# Altium footprint library APE-SBC.PcbLib: 65 footprints (part 3 of 5)
Each footprint in its own frame and in the unit in brackets; x right, y up, seen from the top. Pads: shape width x height; smd on the part's side, far side on the other; paste and mask are expansions set on the pad; w line width, h text height; cw(c..) or ccw(c..) is an arc to the next point about the centre after c.
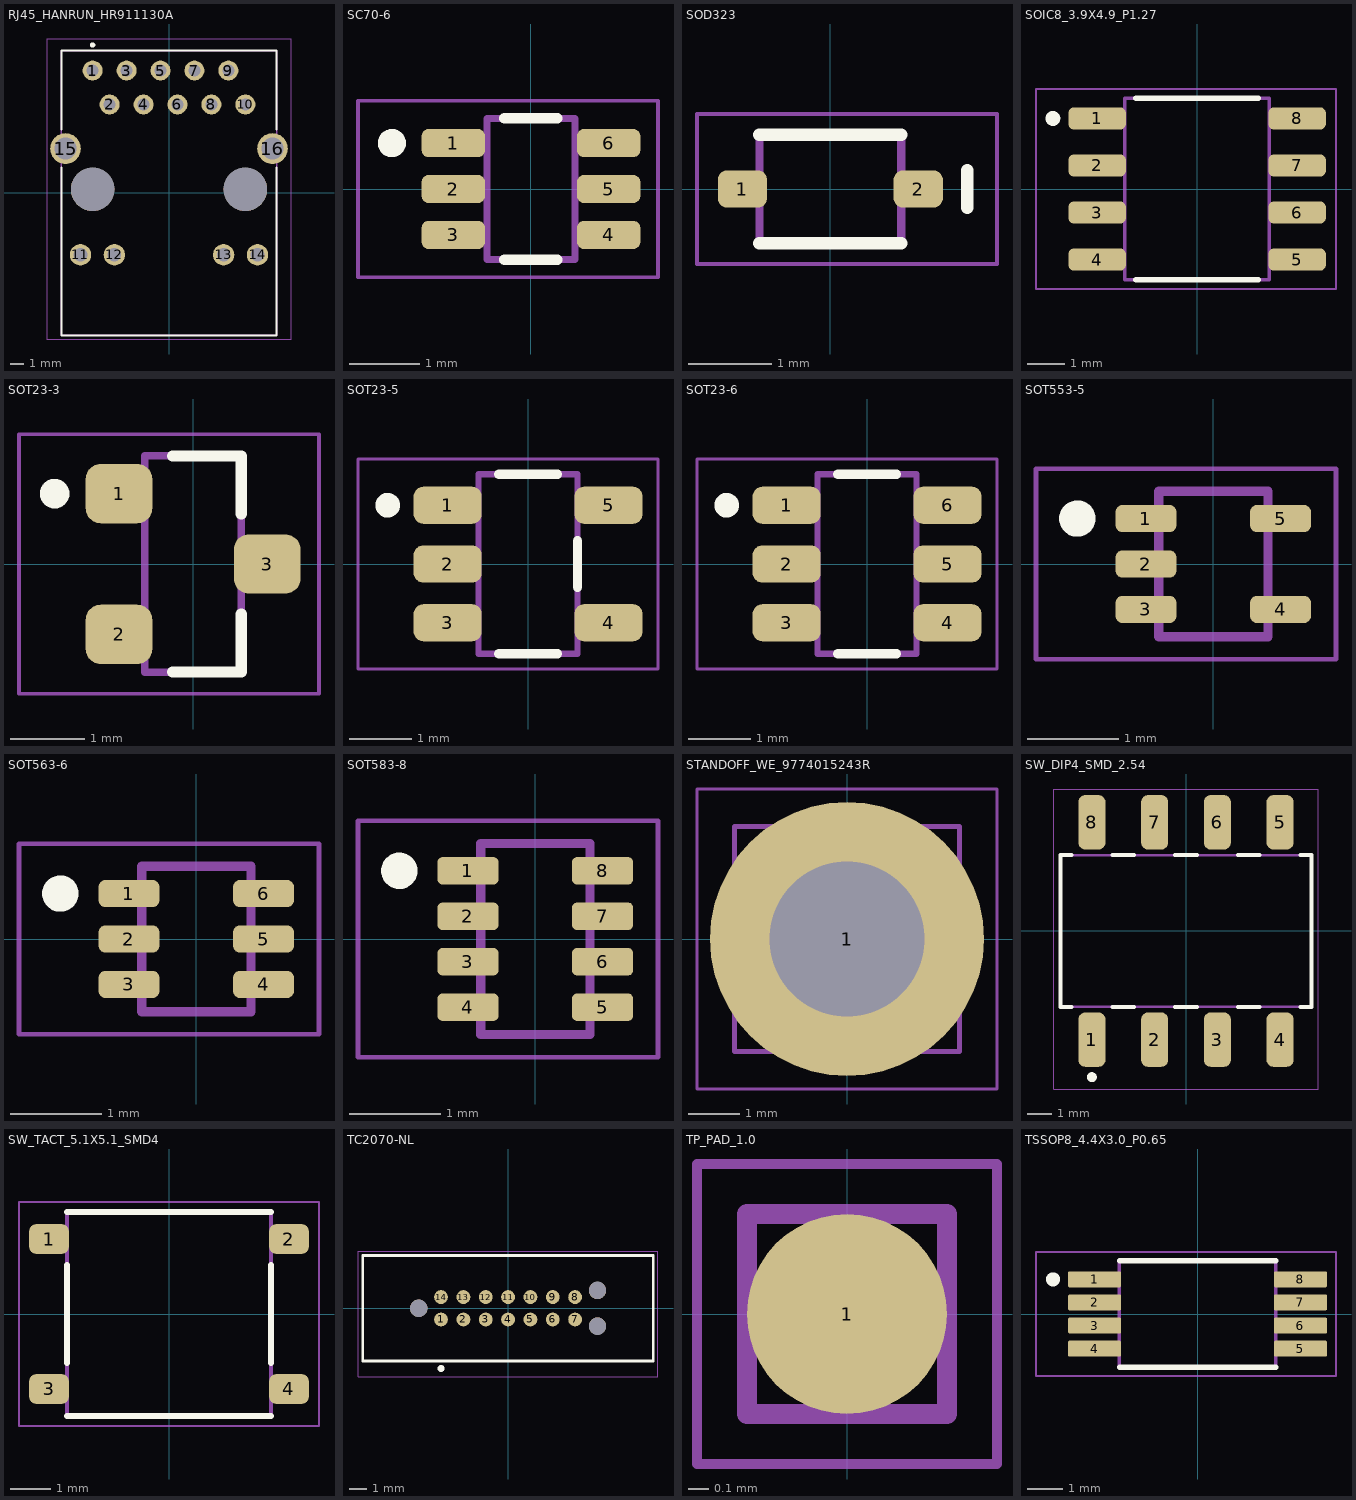
[diagram p2: the footprints below, top view; thin cyan lines are the x and y axes]

## RJ45_HANRUN_HR911130A [mm] "HanRun HR911130A RJ45 MagJack 1000BASE-T with LEDs, shielded, THT (HanRun mounting pattern)"
pads (18):
  round 1.5 hole 0.89: 1(-5.715,9.16) 2(-4.445,6.62) 3(-3.175,9.16) 4(-1.905,6.62) 5(-0.635,9.16) 6(0.635,6.62) 7(1.905,9.16) 8(3.175,6.62) 9(4.445,9.16) 10(5.715,6.62)
  round 1.6 hole 1.02: 11(-6.625,-4.63) 12(-4.085,-4.63) 13(4.085,-4.63) 14(6.625,-4.63)
  round 2.3 hole 1.63: 15(-7.745,3.32) 16(7.745,3.32)
  round 3.25 hole 3.25 unplated: ""(-5.715,0.27) ""(5.715,0.27)
Top Overlay:
  circle w0.2: c-5.715,11.07 r0.1
  lines w0.15: -8.05,1.895 -8.05,-10.65 8.05,-10.65 8.05,1.895 ; -8.05,4.745 -8.05,10.65 8.05,10.65 8.05,4.745
Mechanical 13:
  lines w0.1: -8.05,-10.65 8.05,-10.65 8.05,10.65 -8.05,10.65 -8.05,-10.65
Mechanical 15:
  lines w0.05: -9.15,-10.93 9.15,-10.93 9.15,11.52 -9.15,11.52 -9.15,-10.93

## SC70-6 [mm] "SC70-6 / SOT-363 (TI DCK0006A), 0.65 mm pitch, 0.9 x 0.4 mm pads"
pads (6):
  rrect50% 0.9x0.4 smd: 1(-1.1,0.65) 2(-1.1,0) 3(-1.1,-0.65) 4(1.1,-0.65) 5(1.1,0) 6(1.1,0.65)
Top Overlay:
  circle w0.2: c-1.97,0.65 r0.1
  lines w0.15: -0.375,-1 0.375,-1 ; -0.375,1 0.375,1
Mechanical 13:
  lines w0.1: -0.625,-1 -0.625,1 0.625,1 0.625,-1 -0.625,-1
Mechanical 15:
  lines w0.05: -2.45,-1.25 -2.45,1.25 1.8,1.25 1.8,-1.25 -2.45,-1.25

## SOD323 [mm] "SOD-323 (SC-76) diode, pad 1 anode / pad 2 cathode, Diodes Inc. suggested pad layout"
pads (2):
  rrect50% 0.59x0.45 smd: 1(-1.055,0) 2(1.055,0)
Top Overlay:
  lines w0.15: -0.85,-0.65 0.85,-0.65 ; -0.85,0.65 0.85,0.65 ; 1.645,-0.225 1.645,0.225
Mechanical 13:
  lines w0.1: -0.85,-0.65 0.85,-0.65 0.85,0.65 -0.85,0.65 -0.85,-0.65
Mechanical 15:
  lines w0.05: -1.6,-0.9 2,-0.9 2,0.9 -1.6,0.9 -1.6,-0.9

## SOIC8_3.9X4.9_P1.27 [mm] "SOIC-8 3.9x4.9 mm, 1.27 mm pitch (Microchip SN / Atmel 8S1), Microchip C04-2057-SN land"
pads (8):
  rrect50% 1.55x0.6 smd: 1(-2.7,1.905) 2(-2.7,0.635) 3(-2.7,-0.635) 4(-2.7,-1.905) 5(2.7,-1.905) 6(2.7,-0.635) 7(2.7,0.635) 8(2.7,1.905)
Top Overlay:
  circle w0.2: c-3.895,1.905 r0.1
  lines w0.15: -1.65,-2.45 1.65,-2.45 ; -1.65,2.45 1.65,2.45
Mechanical 13:
  lines w0.1: -1.95,-2.45 1.95,-2.45 1.95,2.45 -1.95,2.45 -1.95,-2.45
Mechanical 15:
  lines w0.05: -4.35,-2.7 3.75,-2.7 3.75,2.7 -4.35,2.7 -4.35,-2.7

## SOT23-3 [mm] "SOT-23 3-lead (LRC soldering footprint), 0.95 mm pitch, 0.9 x 0.8 mm pads"
pads (3):
  rrect50% 0.9x0.8 smd: 1(-1,0.95) 2(-1,-0.95) 3(1,0)
Top Overlay:
  circle w0.2: c-1.87,0.95 r0.1
  lines w0.15: -0.275,-1.46 0.65,-1.46 0.65,-0.675 ; -0.275,1.46 0.65,1.46 0.65,0.675
Mechanical 13:
  lines w0.1: -0.65,-1.46 -0.65,1.46 0.65,1.46 0.65,-1.46 -0.65,-1.46
Mechanical 15:
  lines w0.05: -2.35,-1.75 -2.35,1.75 1.7,1.75 1.7,-1.75 -2.35,-1.75

## SOT23-5 [mm] "SOT-23-5 (TI DBV0005A), 0.95 mm pitch, 1.1 x 0.6 mm pads"
pads (5):
  rrect50% 1.1x0.6 smd: 1(-1.3,0.95) 2(-1.3,0) 3(-1.3,-0.95) 4(1.3,-0.95) 5(1.3,0.95)
Top Overlay:
  circle w0.2: c-2.27,0.95 r0.1
  lines w0.15: -0.475,-1.45 0.475,-1.45 ; -0.475,1.45 0.475,1.45 ; 0.8,-0.375 0.8,0.375
Mechanical 13:
  lines w0.1: -0.8,-1.45 -0.8,1.45 0.8,1.45 0.8,-1.45 -0.8,-1.45
Mechanical 15:
  lines w0.05: -2.75,-1.7 -2.75,1.7 2.1,1.7 2.1,-1.7 -2.75,-1.7

## SOT23-6 [mm] "SOT-23-6 (TI DBV0006A), 0.95 mm pitch, 1.1 x 0.6 mm pads"
pads (6):
  rrect50% 1.1x0.6 smd: 1(-1.3,0.95) 2(-1.3,0) 3(-1.3,-0.95) 4(1.3,-0.95) 5(1.3,0) 6(1.3,0.95)
Top Overlay:
  circle w0.2: c-2.27,0.95 r0.1
  lines w0.15: -0.475,-1.45 0.475,-1.45 ; -0.475,1.45 0.475,1.45
Mechanical 13:
  lines w0.1: -0.8,-1.45 0.8,-1.45 0.8,1.45 -0.8,1.45 -0.8,-1.45
Mechanical 15:
  lines w0.05: -2.75,-1.7 2.1,-1.7 2.1,1.7 -2.75,1.7 -2.75,-1.7

## SOT553-5 [mm] "SOT-553 5-lead (TI DRL0005A), 0.5 mm pitch, 0.67 x 0.3 mm pads"
pads (5):
  rrect50% 0.67x0.3 smd: 1(-0.74,0.5) 2(-0.74,0) 3(-0.74,-0.5) 4(0.74,-0.5) 5(0.74,0.5)
Top Overlay:
  circle w0.2: c-1.495,0.5 r0.1
Mechanical 13:
  lines w0.1: -0.6,-0.8 -0.6,0.8 0.6,0.8 0.6,-0.8 -0.6,-0.8
Mechanical 15:
  lines w0.05: -1.95,-1.05 -1.95,1.05 1.35,1.05 1.35,-1.05 -1.95,-1.05

## SOT563-6 [mm] "SOT-563 6-lead (TI DRL0006A), 0.5 mm pitch, 0.67 x 0.3 mm pads"
pads (6):
  rrect50% 0.67x0.3 smd: 1(-0.74,0.5) 2(-0.74,0) 3(-0.74,-0.5) 4(0.74,-0.5) 5(0.74,0) 6(0.74,0.5)
Top Overlay:
  circle w0.2: c-1.495,0.5 r0.1
Mechanical 13:
  lines w0.1: -0.6,-0.8 0.6,-0.8 0.6,0.8 -0.6,0.8 -0.6,-0.8
Mechanical 15:
  lines w0.05: -1.95,-1.05 1.35,-1.05 1.35,1.05 -1.95,1.05 -1.95,-1.05

## SOT583-8 [mm] "TI DRL0008A SOT-583-8 (SOT-5X3) 1.2x2.1 mm, 0.5 mm pitch (TPS22996)"
pads (8):
  rrect33% 0.67x0.3 smd: 1(-0.74,0.75) 2(-0.74,0.25) 3(-0.74,-0.25) 4(-0.74,-0.75) 5(0.74,-0.75) 6(0.74,-0.25) 7(0.74,0.25) 8(0.74,0.75)
Top Overlay:
  circle w0.2: c-1.495,0.75 r0.1
Mechanical 13:
  lines w0.1: -0.6,-1.05 -0.6,1.05 0.6,1.05 0.6,-1.05 -0.6,-1.05
Mechanical 15:
  lines w0.05: -1.95,-1.3 -1.95,1.3 1.35,1.3 1.35,-1.3 -1.95,-1.3

## STANDOFF_WE_9774015243R [mm] "Wurth WA-SMSI 9774015243R SMT spacer M2 L1.5, 5.3 mm ring pad, 3.0 mm NPTH"
pads (1):
  round 5.3 hole 3 unplated: 1(0,0)
Top Paste:
  lines w0.35: -2.378,-0.475 ccw(c0,0) -0.475,-2.378 ; -2.378,0.475 cw(c0,0) -0.475,2.378 ; -2.02,-0.475 ccw(c0,0) -0.475,-2.02 ; -2.02,0.475 cw(c0,0) -0.475,2.02 ; -1.658,-0.475 ccw(c0,0) -0.475,-1.658 ; -1.658,0.475 cw(c0,0) -0.475,1.658 ; 0.475,-2.378 ccw(c0,0) 2.378,-0.475 ; 0.475,-2.02 ccw(c0,0) 2.02,-0.475 ; 0.475,-1.658 ccw(c0,0) 1.658,-0.475 ; 0.475,1.658 cw(c0,0) 1.658,0.475 ; 0.475,2.02 cw(c0,0) 2.02,0.475 ; 0.475,2.378 cw(c0,0) 2.378,0.475
Mechanical 13:
  lines w0.1: -2.175,-2.175 2.175,-2.175 2.175,2.175 -2.175,2.175 -2.175,-2.175
Mechanical 15:
  lines w0.05: -2.9,-2.9 2.9,-2.9 2.9,2.9 -2.9,2.9 -2.9,-2.9

## SW_DIP4_SMD_2.54 [mm] "DIP switch 4-position SPST, 2.54 mm SMD gull wing (SHOU HAN 2.54-4P TPGT)"
pads (8):
  rrect50% 1.1x2.2 smd: 1(-3.81,-4.4) 2(-1.27,-4.4) 3(1.27,-4.4) 4(3.81,-4.4) 5(3.81,4.4) 6(1.27,4.4) 7(-1.27,4.4) 8(-3.81,4.4)
Top Overlay:
  circle w0.2: c-3.81,-5.92 r0.1
  lines w0.15: -4.635,-3.075 -5.08,-3.075 -5.08,3.075 -4.635,3.075 ; -2.985,-3.075 -2.095,-3.075 ; -2.985,3.075 -2.095,3.075 ; -0.445,-3.075 0.445,-3.075 ; -0.445,3.075 0.445,3.075 ; 2.095,-3.075 2.985,-3.075 ; 2.095,3.075 2.985,3.075 ; 4.635,-3.075 5.08,-3.075 5.08,3.075 4.635,3.075
Mechanical 13:
  lines w0.1: -5.08,-3.075 -5.08,3.075 5.08,3.075 5.08,-3.075 -5.08,-3.075
Mechanical 15:
  lines w0.05: -5.35,-6.4 -5.35,5.75 5.35,5.75 5.35,-6.4 -5.35,-6.4

## SW_TACT_5.1X5.1_SMD4 [mm] "Tactile switch 5.1x5.1 mm SPST-NO, 4 SMD terminals A=B / C=D (XKB TS-1187A)"
pads (4):
  rrect50% 1x0.75 smd: 1(-3,1.875) 2(3,1.875) 3(-3,-1.875) 4(3,-1.875)
Top Overlay:
  lines w0.15: -2.55,-2.55 2.55,-2.55 ; -2.55,-1.225 -2.55,1.225 ; -2.55,2.55 2.55,2.55 ; 2.55,-1.225 2.55,1.225
Mechanical 13:
  lines w0.1: -2.55,-2.55 2.55,-2.55 2.55,2.55 -2.55,2.55 -2.55,-2.55
Mechanical 15:
  lines w0.05: -3.75,-2.8 3.75,-2.8 3.75,2.8 -3.75,2.8 -3.75,-2.8

## TC2070-NL [mm] "Tag-Connect TC2070-NL plug-of-nails footprint, 14 pads, no paste, 3 NPTH (not a part, DNL)"
pads (17):
  round 0.787 smd: 1(-3.81,-0.635) 2(-2.54,-0.635) 3(-1.27,-0.635) 4(0,-0.635) 5(1.27,-0.635) 6(2.54,-0.635) 7(3.81,-0.635) 8(3.81,0.635) 9(2.54,0.635) 10(1.27,0.635) 11(0,0.635) 12(-1.27,0.635) 13(-2.54,0.635) 14(-3.81,0.635)
  round 0.99 hole 0.99 unplated: ""(-5.08,0) ""(5.08,-1.016) ""(5.08,1.016)
Top Overlay:
  circle w0.2: c-3.81,-3.42 r0.1
  lines w0.15: -8.25,-3 8.25,-3 8.25,3 -8.25,3 -8.25,-3
Mechanical 13:
  lines w0.1: -8.25,-3 8.25,-3 8.25,3 -8.25,3 -8.25,-3
Mechanical 15:
  lines w0.05: -8.53,-3.9 8.52,-3.9 8.52,3.25 -8.53,3.25 -8.53,-3.9

## TP_PAD_1.0 [mm] "Test pad, 1.0 mm round SMD"
pads (1):
  round 1 smd: 1(0,0)
Mechanical 13:
  lines w0.1: -0.5,-0.5 -0.5,0.5 0.5,0.5 0.5,-0.5 -0.5,-0.5
Mechanical 15:
  lines w0.05: -0.75,-0.75 -0.75,0.75 0.75,0.75 0.75,-0.75 -0.75,-0.75

## TSSOP8_4.4X3.0_P0.65 [mm] "TSSOP-8 4.4x3.0 mm, 0.65 mm pitch (MO-153 AA), TI PW0008A land"
pads (8):
  rrect22% 1.5x0.45 smd: 1(-2.9,0.975) 2(-2.9,0.325) 3(-2.9,-0.325) 4(-2.9,-0.975) 5(2.9,-0.975) 6(2.9,-0.325) 7(2.9,0.325) 8(2.9,0.975)
Top Overlay:
  circle w0.2: c-4.07,0.975 r0.1
  lines w0.15: -2.2,-1.5 2.2,-1.5 ; -2.2,1.5 2.2,1.5
Mechanical 13:
  lines w0.1: -2.2,-1.5 -2.2,1.5 2.2,1.5 2.2,-1.5 -2.2,-1.5
Mechanical 15:
  lines w0.05: -4.55,-1.75 -4.55,1.75 3.9,1.75 3.9,-1.75 -4.55,-1.75